# Altium footprint library PcbLib1.PcbLib: 25 footprints (part 1 of 2)
Each footprint in its own frame and in the unit in brackets; x right, y up, seen from the top. Pads: shape width x height; smd on the part's side, far side on the other; paste and mask are expansions set on the pad; w line width, h text height; cw(c..) or ccw(c..) is an arc to the next point about the centre after c.
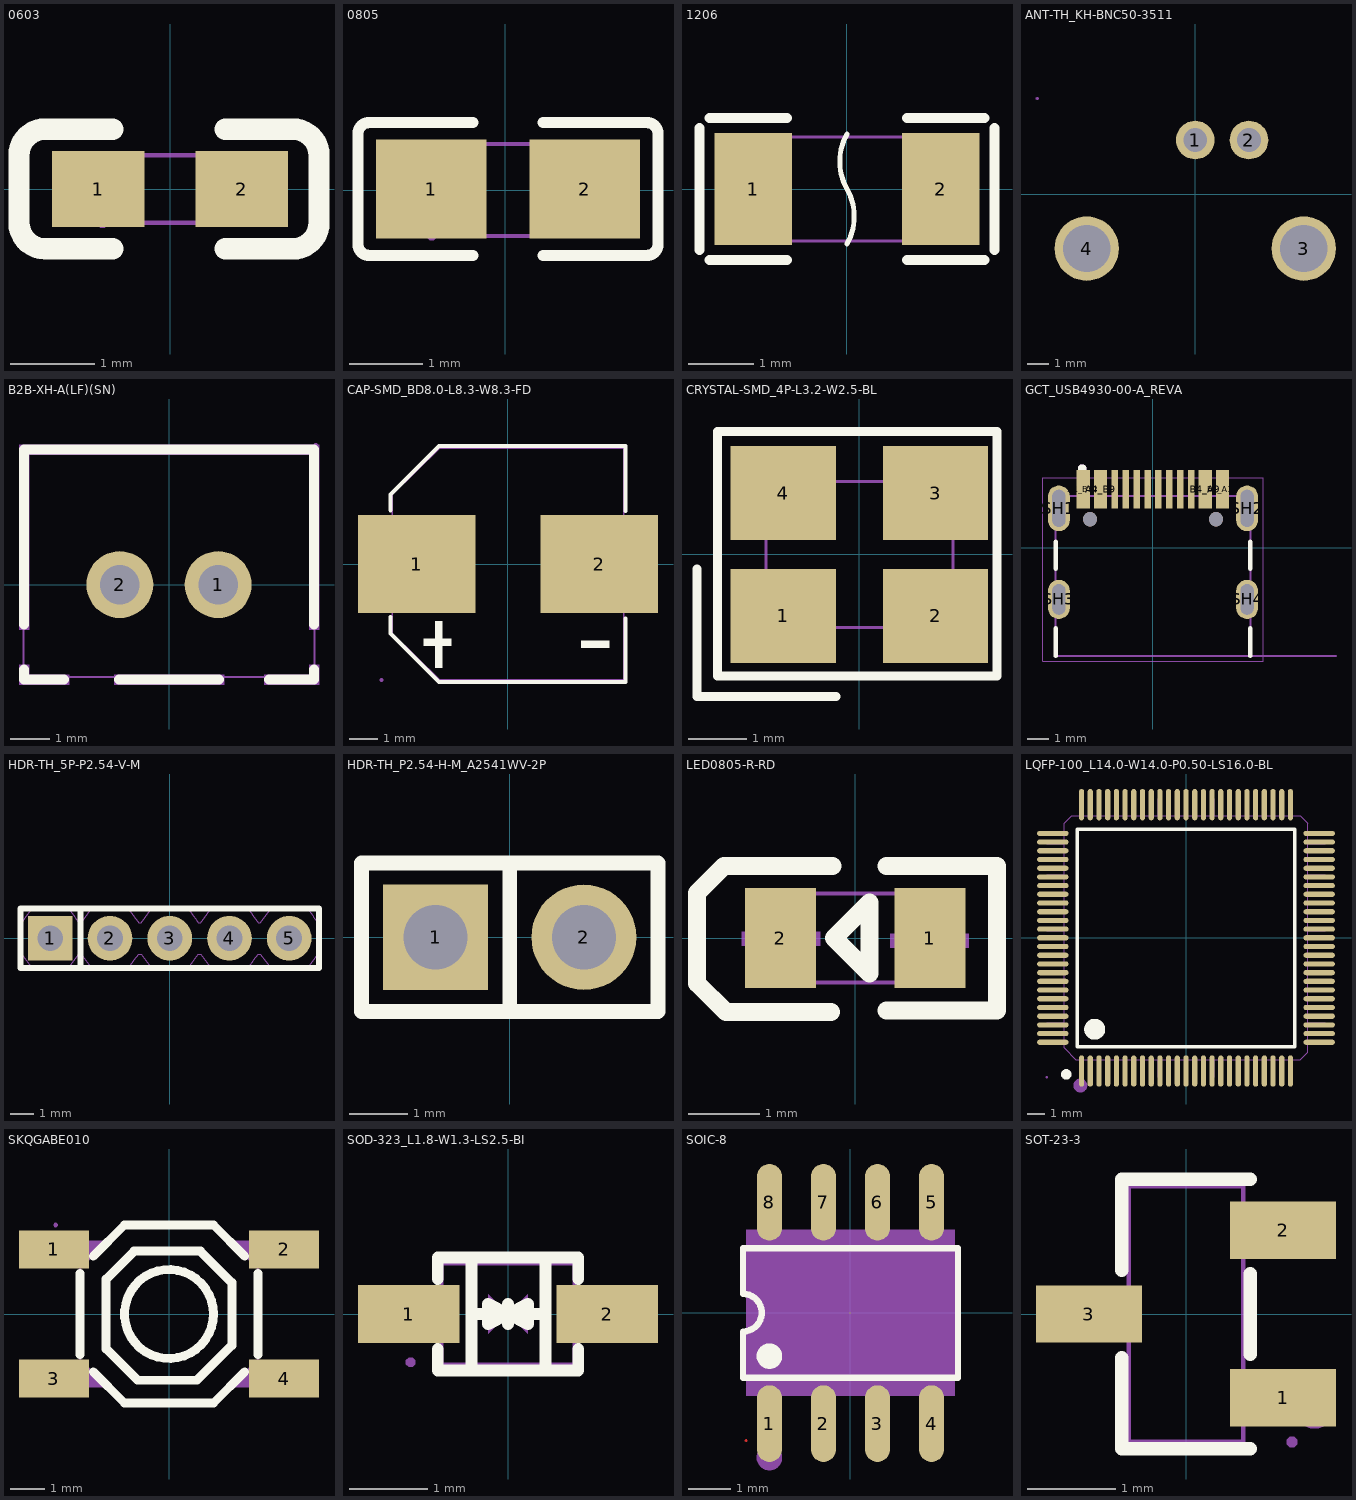
[diagram p0: the footprints below, top view; thin cyan lines are the x and y axes]

## 0603 [mm]
pads (2):
  rect 1.1x0.9 smd: 1(-0.85,0) 2(0.85,0)
Top Overlay:
  lines w0.254: -0.68,-0.71 -1.48,-0.71 cw(c-1.48,-0.4) -1.79,-0.4 -1.79,0.4 cw(c-1.48,0.4) -1.48,0.71 -0.68,0.71 ; 0.655,-0.71 1.455,-0.71 ccw(c1.455,-0.4) 1.765,-0.4 1.765,0.4 ccw(c1.455,0.4) 1.455,0.71 0.655,0.71
Mechanical 15:
  region: 0.8,-0.4 0.8,0.4 0.5,0.4 0.5,-0.4
  region: -0.8,-0.4 -0.8,0.4 -0.5,0.4 -0.5,-0.4
  region: -0.74,-0.4 -0.74,-0.425 -0.775,-0.46 -0.825,-0.46 -0.86,-0.425 -0.86,-0.4 -0.86,-0.375 -0.825,-0.34 -0.775,-0.34 -0.74,-0.375 -0.74,-0.4
  lines w0.051: -0.8,-0.4 0.8,-0.4 0.8,0.4 -0.8,0.4 -0.8,-0.4

## 0805 [mm]
pads (2):
  rect 1.5x1.35 smd mask+0.051: 1(-1.008,0.014) 2(1.082,0.014)
Top Overlay:
  lines w0.152: -0.439,-0.89 -1.849,-0.89 cw(c-1.849,-0.737) -2.002,-0.737 -2.002,0.765 cw(c-1.849,0.765) -1.849,0.918 -0.439,0.918 ; 0.513,-0.89 1.923,-0.89 ccw(c1.923,-0.737) 2.076,-0.737 2.076,0.765 ccw(c1.923,0.765) 1.923,0.918 0.513,0.918
Top Paste:
  region: 1.705,0.64 1.705,-0.64 1.655,-0.69 0.505,-0.69 0.455,-0.64 0.45,-0.23 0.9,-0.23 0.9,0.22 0.46,0.22 0.455,0.64 0.505,0.69 1.655,0.69
  region: -1.705,-0.64 -1.705,0.64 -1.655,0.69 -0.505,0.69 -0.455,0.64 -0.45,0.23 -0.9,0.23 -0.9,-0.22 -0.46,-0.22 -0.455,-0.64 -0.505,-0.69 -1.655,-0.69
Mechanical 15:
  region: 1,0.625 1,-0.625 0.5,-0.625 0.5,0.625
  region: -1,-0.625 -1,0.625 -0.5,0.625 -0.5,-0.625
  region: -0.94,-0.625 -0.94,-0.65 -0.975,-0.685 -1.025,-0.685 -1.06,-0.65 -1.06,-0.625 -1.06,-0.6 -1.025,-0.565 -0.975,-0.565 -0.94,-0.6 -0.94,-0.625
  lines w0.051: -1,-0.625 1,-0.625 1,0.625 -1,0.625 -1,-0.625

## 1206 [mm]
pads (2):
  rect 1.19x1.728 smd: 1(-1.445,0) 2(1.445,0)
Top Overlay:
  lines w0.076: 0,-0.845 ccw(c-0.732,-0.422) 0,0 cw(c0.732,0.422) 0,0.845
  lines w0.152: -2.269,-0.94 -2.269,0.94 ; -2.116,-1.093 -0.926,-1.093 ; -2.116,1.093 -0.926,1.093 ; 0.926,-1.093 2.116,-1.093 ; 0.926,1.093 2.116,1.093 ; 2.269,-0.94 2.269,0.94
Mechanical 15:
  region: 1.1,-0.8 1.6,-0.8 1.6,0.8 1.1,0.8
  region: -1.6,-0.8 -1.1,-0.8 -1.1,0.8 -1.6,0.8
  region: -1.54,-0.8 -1.54,-0.825 -1.575,-0.86 -1.625,-0.86 -1.66,-0.825 -1.66,-0.8 -1.66,-0.775 -1.625,-0.74 -1.575,-0.74 -1.54,-0.775 -1.54,-0.8
  lines w0.051: -1.6,-0.8 -1.6,0.8 1.6,0.8 1.6,-0.8 -1.6,-0.8

## ANT-TH_KH-BNC50-3511 [mm]
pads (4):
  round 1.8 hole 1.1 paste-2539.97 mask+0.05: 1(0,2.525) 2(2.5,2.525)
  round 3 hole 2.2 paste-2539.97 mask+0.05: 3(5.05,-2.525) 4(-5.05,-2.525)
Mechanical 15:
  region: -4.15,-3.425 -5.95,-3.425 -5.95,-1.625 -4.15,-1.625
  region: 5.95,-3.425 4.15,-3.425 4.15,-1.625 5.95,-1.625
  region: -7.29,4.46 -7.29,4.435 -7.325,4.4 -7.375,4.4 -7.41,4.435 -7.41,4.46 -7.41,4.485 -7.375,4.52 -7.325,4.52 -7.29,4.485 -7.29,4.46
  region: 0.3,2.525 0.3,2.465 0.254,2.355 0.17,2.271 0.06,2.225 -0.06,2.225 -0.17,2.271 -0.254,2.355 -0.3,2.465 -0.3,2.525 -0.3,2.585 -0.254,2.695 -0.17,2.779 -0.06,2.825 0.06,2.825 0.17,2.779 0.254,2.695 0.3,2.585 0.3,2.525
  region: 2.8,2.525 2.8,2.465 2.754,2.355 2.67,2.271 2.56,2.225 2.44,2.225 2.33,2.271 2.246,2.355 2.2,2.465 2.2,2.525 2.2,2.585 2.246,2.695 2.33,2.779 2.44,2.825 2.56,2.825 2.67,2.779 2.754,2.695 2.8,2.585 2.8,2.525

## B2B-XH-A(LF)(SN) [mm]
pads (2):
  round 1.7 hole 1: 1(1.25,0) 2(-1.25,0)
Top Overlay:
  lines w0.254: -3.683,-2.159 -3.683,-2.413 -2.667,-2.413 ; -3.683,-1.016 -3.683,3.429 3.683,3.429 3.683,-1.016 ; -1.27,-2.413 1.27,-2.413 ; 2.54,-2.413 3.683,-2.413 3.683,-2.159
Mechanical 6:
  region: -1.397,-2.54 -1.397,-2.286 1.397,-2.286 1.397,-2.54
  region: 2.413,-2.54 3.81,-2.54 3.81,-2.032 3.556,-2.032 3.556,-2.286 2.413,-2.286
  region: -2.54,-2.54 -3.81,-2.54 -3.81,-2.032 -3.556,-2.032 -3.556,-2.286 -2.54,-2.286
  region: -3.81,-1.143 -3.81,3.556 3.81,3.556 3.81,-1.143 3.556,-1.143 3.556,3.302 -3.556,3.302 -3.556,-1.143
Mechanical 15:
  region: 3.787,3.527 3.787,3.502 3.752,3.467 3.702,3.467 3.667,3.502 3.667,3.527 3.667,3.552 3.702,3.587 3.752,3.587 3.787,3.552 3.787,3.527
  region: -0.95,-0.32 -1.59,-0.32 -1.59,0.32 -0.95,0.32
  region: 1.59,-0.32 0.95,-0.32 0.95,0.32 1.59,0.32
  lines w0.051: -3.7,-2.35 -3.7,3.4 3.7,3.4 3.7,-2.35 -3.7,-2.35

## CAP-SMD_BD8.0-L8.3-W8.3-FD [mm]
pads (2):
  rect 4.2x3.5 smd: 1(-3.267,0) 2(3.267,0)
Top Overlay:
  region: -3.021,-2.676 -3.021,-2.924 -2.025,-2.924 -2.025,-2.676
  region: -2.599,-2.045 -2.599,-3.705 -2.35,-3.705 -2.35,-2.045
  region: 3.623,-2.751 3.623,-3 2.627,-3 2.627,-2.751
  lines w0.152: -4.201,-1.9 -4.201,-2.49 -2.465,-4.226 4.201,-4.226 4.201,-1.95 ; -4.201,1.925 -4.201,2.49 -2.465,4.226 4.201,4.226 4.201,1.9
Mechanical 6:
  region: 3.876,0.125 3.876,-0.125 2.88,-0.125 2.88,0.125
  region: -3.876,0.125 -3.876,-0.125 -2.88,-0.125 -2.88,0.125
  region: -3.503,0.83 -3.503,-0.83 -3.254,-0.83 -3.254,0.83
Mechanical 15:
  region: -4.465,-4.15 -4.465,-4.175 -4.5,-4.21 -4.549,-4.21 -4.584,-4.175 -4.584,-4.15 -4.584,-4.125 -4.549,-4.09 -4.5,-4.09 -4.465,-4.125 -4.465,-4.15
  region: 1.574,0.45 4.524,0.45 4.524,-0.45 1.574,-0.45
  region: -4.524,0.45 -1.574,0.45 -1.574,-0.45 -4.524,-0.45
  lines w0.051: -4.15,-2.49 -2.465,-4.15 4.15,-4.15 4.15,4.15 -2.465,4.15 -4.15,2.49 -4.15,-2.49

## CRYSTAL-SMD_4P-L3.2-W2.5-BL [mm]
pads (4):
  rect 1.8x1.6 smd: 1(-1.3,-1.05) 2(1.3,-1.05) 3(1.3,1.05) 4(-1.3,1.05)
Top Overlay:
  lines w0.152: -2.775,-0.25 -2.775,-2.425 -0.4,-2.425 ; -2.425,-2.075 -2.425,2.1 2.35,2.1 2.35,-2.075 -2.425,-2.075
Mechanical 6:
  circle w0.254: c-1.27,-0.889 r0.127
Mechanical 15:
  region: -1.54,-1.25 -1.54,-1.275 -1.575,-1.31 -1.625,-1.31 -1.66,-1.275 -1.66,-1.25 -1.66,-1.225 -1.625,-1.19 -1.575,-1.19 -1.54,-1.225 -1.54,-1.25
  region: -1.5,1.15 -0.6,1.15 -0.6,0.35 -1.5,0.35
  region: 0.6,1.15 1.5,1.15 1.5,0.35 0.6,0.35
  region: 0.6,-0.35 1.5,-0.35 1.5,-1.15 0.6,-1.15
  region: -1.5,-0.35 -0.6,-0.35 -0.6,-1.15 -1.5,-1.15
  lines w0.051: -1.6,-1.25 -1.6,1.25 1.6,1.25 1.6,-1.25 -1.6,-1.25

## GCT_USB4930-00-A_REVA [mm]
pads (18):
  rect 0.6x1.75 smd paste+0 mask+0.025: A1_B12(-3.2,2.678) A4_B9(-2.4,2.678) B1_A12(3.2,2.678) B4_A9(2.4,2.678)
  rect 0.3x1.75 smd paste+0 mask+0.025: A5(-1.25,2.678) A6(-0.25,2.678) A7(0.25,2.678) A8(1.25,2.678) B5(1.75,2.678) B6(0.75,2.678) B7(-0.75,2.678) B8(-1.75,2.678)
  oval 1x2.1 hole 0.6 slot 1.7 at 90 deg mask+0.102: SH1(-4.32,1.803) SH2(4.32,1.803)
  oval 1x1.8 hole 0.6 slot 1.4 at 90 deg mask+0.102: SH3(-4.32,-2.377) SH4(4.32,-2.377)
  round 0.65 hole 0.65 unplated mask+0: ""(-2.89,1.303) ""(2.89,1.303)
Top Overlay:
  circle w0.2: c-3.25,3.623 r0.1
  lines w0.2: -4.47,-4.977 -4.47,-3.697 ; -4.47,-0.977 -4.47,0.273 ; 4.47,-4.977 4.47,-3.697 ; 4.47,-0.977 4.47,0.273
Mechanical 13:
  circle w0.2: c-3.25,3.623 r0.1
  lines w0.1: 8.4,-4.977 4.47,-4.977 ; 4.47,-4.977 4.47,2.373 -4.47,2.373 -4.47,-4.977 4.47,-4.977
  text "PCB EDGE" at 5.4,-4.877 h0.41
Mechanical 15:
  lines w0.05: -5.07,-5.227 -5.07,3.203 5.07,3.203 5.07,-5.227 -5.07,-5.227

## HDR-TH_5P-P2.54-V-M [mm]
pads (5):
  rect 1.9x1.9 hole 1.1: 1(-5.08,0)
  round 1.9 hole 1.1: 2(-2.54,0) 3(0,0) 4(2.54,0) 5(5.08,0)
Top Overlay:
  lines w0.254: -3.786,-1.27 -3.786,1.27 ; -6.35,-1.27 -6.35,1.27 6.35,1.27 6.35,-1.27 -6.35,-1.27
Mechanical 15:
  region: -5.4,0.32 -4.76,0.32 -4.76,-0.32 -5.4,-0.32
  region: -2.86,0.32 -2.22,0.32 -2.22,-0.32 -2.86,-0.32
  region: -0.32,0.32 0.32,0.32 0.32,-0.32 -0.32,-0.32
  region: 2.22,0.32 2.86,0.32 2.86,-0.32 2.22,-0.32
  region: 4.76,0.32 5.4,0.32 5.4,-0.32 4.76,-0.32
  region: -6.29,-1.271 -6.29,-1.296 -6.325,-1.331 -6.375,-1.331 -6.41,-1.296 -6.41,-1.271 -6.41,-1.246 -6.375,-1.211 -6.325,-1.211 -6.29,-1.246 -6.29,-1.271
  lines w0.051: -6.35,-0.67 -6.35,-0.67 -6.3,-0.67 -5.85,-1.27 -4.31,-1.27 -4.077,-0.965 -3.86,-0.67 -3.76,-0.67 -3.31,-1.27 -1.77,-1.27 -1.542,-0.972 -1.503,-0.919 -1.32,-0.67 -1.22,-0.67 -0.77,-1.27 0.77,-1.27 0.992,-0.98 1.02,-0.942 1.22,-0.67 1.32,-0.67 1.77,-1.27 3.31,-1.271 3.51,-1.009 3.545,-0.963 3.581,-0.913 3.759,-0.67 3.86,-0.67 4.31,-1.27 5.85,-1.27 6.075,-0.976 6.3,-0.67 6.35,-0.67 6.35,0.67 6.3,0.67 6.112,0.925 6.079,0.97 5.85,1.27 4.311,1.27 3.86,0.67 3.76,0.67 3.533,0.979 3.458,1.076 3.31,1.27 1.77,1.27 1.32,0.67 1.22,0.67 1.136,0.783 1.108,0.822 1.01,0.955 0.867,1.143 0.77,1.27 -0.77,1.27 -1.22,0.67 -1.32,0.67 -1.417,0.801 -1.436,0.827 -1.459,0.859 -1.546,0.976 -1.631,1.088 -1.77,1.27 -3.31,1.27 -3.76,0.67 -3.86,0.67 -4.017,0.884 -4.048,0.925 -4.149,1.059 -4.31,1.27 -5.85,1.27 -6.028,1.032 -6.299,0.67 -6.35,0.67 -6.35,-0.67 ; -6.35,-0.67 -6.35,-0.67

## HDR-TH_P2.54-H-M_A2541WV-2P [mm]
pads (2):
  rect 1.8x1.8 hole 1.1: 1(-1.27,0)
  round 1.8 hole 1.1: 2(1.27,0)
Top Overlay:
  lines w0.254: -0.001,-1.27 -0.001,1.27 ; -2.54,-1.27 -2.54,1.27 2.54,1.27 2.54,-1.27 -2.54,-1.27
Mechanical 15:
  region: 0.95,0.32 1.59,0.32 1.59,-0.32 0.95,-0.32
  region: -1.59,0.32 -0.95,0.32 -0.95,-0.32 -1.59,-0.32
  region: -2.48,-1.27 -2.48,-1.295 -2.515,-1.33 -2.565,-1.33 -2.6,-1.295 -2.6,-1.27 -2.6,-1.245 -2.565,-1.21 -2.515,-1.21 -2.48,-1.245 -2.48,-1.27
  lines w0.051: -2.54,-1.27 2.54,-1.27 2.54,1.27 -2.54,1.27 -2.54,-1.27

## LED0805-R-RD [mm]
pads (2):
  rect 1x1.4 smd: 1(1.05,0) 2(-1.05,0)
Top Overlay:
  lines w0.254: -0.344,-1.043 -1.817,-1.043 -2.224,-0.636 -2.224,0.634 -1.843,1.015 -0.319,1.015 ; 0.443,-1.017 1.993,-1.017 1.993,1.015 0.443,1.015 ; -0.3,0 -0.2,0.1 0.2,0.5 0.2,-0.5 -0.2,-0.1 -0.3,0
Mechanical 6:
  region: 0.941,-0.556 0.941,0.544 1.141,0.544 1.141,-0.556
  region: 0.494,0.06 1.594,0.06 1.594,-0.14 0.494,-0.14
  region: -0.494,-0.109 -1.594,-0.109 -1.594,0.091 -0.494,0.091
Mechanical 15:
  region: 1.06,0.625 1.06,0.6 1.025,0.565 0.975,0.565 0.94,0.6 0.94,0.625 0.94,0.65 0.975,0.685 1.025,0.685 1.06,0.65 1.06,0.625
  region: 1,-0.625 0.6,-0.625 0.6,0.625 1,0.625
  region: -0.6,-0.625 -1,-0.625 -1,0.625 -0.6,0.625
  lines w0.051: -1,-0.625 -1,0.625 1,0.625 1,-0.625 -1,-0.625

## LQFP-100_L14.0-W14.0-P0.50-LS16.0-BL [mm]
pads (100):
  oval 0.3x1.8 smd mask+0.025: 1(-6,-7.65) 2(-5.5,-7.65) 3(-5,-7.65) 4(-4.5,-7.65) 5(-4,-7.65) 6(-3.5,-7.65) 7(-3,-7.65) 8(-2.5,-7.65) 9(-2,-7.65) 10(-1.5,-7.65) 11(-1,-7.65) 12(-0.5,-7.65) 13(0,-7.65) 14(0.5,-7.65) 15(1,-7.65) 16(1.5,-7.65) 17(2,-7.65) 18(2.5,-7.65) 19(3,-7.65) 20(3.5,-7.65) 21(4,-7.65) 22(4.5,-7.65) 23(5,-7.65) 24(5.5,-7.65) 25(6,-7.65) 51(6,7.65) 52(5.5,7.65) 53(5,7.65) 54(4.5,7.65) 55(4,7.65) 56(3.5,7.65) 57(3,7.65) 58(2.5,7.65) 59(2,7.65) 60(1.5,7.65) 61(1,7.65) 62(0.5,7.65) 63(0,7.65) 64(-0.5,7.65) 65(-1,7.65) 66(-1.5,7.65) 67(-2,7.65) 68(-2.5,7.65) 69(-3,7.65) 70(-3.5,7.65) 71(-4,7.65) 72(-4.5,7.65) 73(-5,7.65) 74(-5.5,7.65) 75(-6,7.65)
  oval 1.8x0.3 smd mask+0.025: 26(7.65,-6) 27(7.65,-5.5) 28(7.65,-5) 29(7.65,-4.5) 30(7.65,-4) 31(7.65,-3.5) 32(7.65,-3) 33(7.65,-2.5) 34(7.65,-2) 35(7.65,-1.5) 36(7.65,-1) 37(7.65,-0.5) 38(7.65,0) 39(7.65,0.5) 40(7.65,1) 41(7.65,1.5) 42(7.65,2) 43(7.65,2.5) 44(7.65,3) 45(7.65,3.5) 46(7.65,4) 47(7.65,4.5) 48(7.65,5) 49(7.65,5.5) 50(7.65,6) 76(-7.65,6) 77(-7.65,5.5) 78(-7.65,5) 79(-7.65,4.5) 80(-7.65,4) 81(-7.65,3.5) 82(-7.65,3) 83(-7.65,2.5) 84(-7.65,2) 85(-7.65,1.5) 86(-7.65,1) 87(-7.65,0.5) 88(-7.65,0) 89(-7.65,-0.5) 90(-7.65,-1) 91(-7.65,-1.5) 92(-7.65,-2) 93(-7.65,-2.5) 94(-7.65,-3) 95(-7.65,-3.5) 96(-7.65,-4) 97(-7.65,-4.5) 98(-7.65,-5) 99(-7.65,-5.5) 100(-7.65,-6)
Top Overlay:
  lines w0.2: -6.25,-6.25 -6.25,6.25 6.25,6.25 6.25,-6.25 -6.25,-6.25
  lines w0.3: -6.883,-7.696 ccw(c-6.882,-7.846) -6.882,-7.996 ccw(c-6.882,-7.846) -6.881,-7.696
  lines w0.6: -5.25,-4.95 ccw(c-5.248,-5.25) -5.248,-5.55 ccw(c-5.248,-5.25) -5.245,-4.95
Mechanical 6:
  circle w0.4: c-6.071,-8.484 r0.2
Mechanical 15:
  drawing of 209 lines, arcs and shapes, not listed

## SKQGABE010 [mm]
pads (4):
  rect 2x1.1 smd: 1(-3.3,1.85) 2(3.3,1.85) 3(-3.3,-1.85) 4(3.3,-1.85)
Top Overlay:
  circle w0.254: c0,0 r1.275
  lines w0.254: -2.55,-1.168 -2.55,1.168 ; -2.17,-1.655 -1.275,-2.55 1.275,-2.55 2.17,-1.655 ; -2.17,1.655 -1.275,2.55 1.275,2.55 2.17,1.655 ; 2.55,-1.168 2.55,1.168 ; -1.801,-0.998 -1.801,1.001 -1.001,1.801 0.899,1.801 1.801,0.899 1.801,-0.899 0.8,-1.9 -0.899,-1.9 -1.801,-0.998
Mechanical 15:
  region: -2.2,1.599 -1.7,2.099 -2.86,2.1 -2.86,1.6
  region: 2.201,-1.601 1.701,-2.101 2.861,-2.101 2.861,-1.601
  region: -2.2,-1.6 -1.7,-2.1 -2.86,-2.1 -2.86,-1.6
  region: -3.25,-2.1 -3.25,-1.6 -2.85,-1.6 -2.85,-2.1
  region: -3.25,1.599 -3.25,2.099 -2.85,2.099 -2.85,1.599
  region: 2.85,1.6 2.85,2.1 3.25,2.1 3.25,1.6
  region: 2.2,1.6 1.7,2.1 2.86,2.1 2.86,1.6
  region: 2.85,-2.1 2.85,-1.6 3.25,-1.6 3.25,-2.1
  region: -3.19,2.55 -3.19,2.525 -3.225,2.49 -3.275,2.49 -3.31,2.525 -3.31,2.55 -3.31,2.575 -3.275,2.61 -3.225,2.61 -3.19,2.575 -3.19,2.55
  lines w0.051: -2.55,-1.3 -2.55,1.3 -1.3,2.55 1.3,2.55 2.55,1.3 2.55,-1.3 1.3,-2.55 -1.3,-2.55 -2.55,-1.3

## SOD-323_L1.8-W1.3-LS2.5-BI [mm]
pads (2):
  rect 1.3x0.75 smd: 1(-1.275,0) 2(1.275,0)
Top Overlay:
  lines w0.152: -0.901,-0.448 -0.901,-0.726 0.901,-0.726 0.901,-0.448 ; -0.901,0.448 -0.901,0.726 0.901,0.726 0.901,0.448 ; -0.467,-0.726 -0.467,0.726 ; 0.483,-0.726 0.483,0.726
  lines w0.154: -0.467,0 0.483,0.003 ; -0.127,0 0.003,0 0.254,0.127 0.254,-0.127 0.002,-0.003 ; -0.002,0.003 -0.254,0.127 -0.254,-0.127 -0.003,0 0.127,0 ; 0,-0.127 0,0.127
Mechanical 6:
  region: 0.254,-0.254 0.254,0.254 0,0
  region: -0.254,0.254 -0.254,-0.254 0,0
Mechanical 15:
  region: -1.25,-0.163 -1.25,0.163 -0.95,0.163 -0.95,-0.163
  region: -0.96,-0.163 -0.96,0.163 -0.84,0.163 -0.84,-0.163
  region: 0.95,-0.163 0.95,0.163 1.25,0.163 1.25,-0.163
  region: 0.84,-0.163 0.84,0.163 0.96,0.163 0.96,-0.163
  region: -1.19,-0.62 -1.19,-0.645 -1.225,-0.68 -1.275,-0.68 -1.31,-0.645 -1.31,-0.62 -1.31,-0.595 -1.275,-0.56 -1.225,-0.56 -1.19,-0.595 -1.19,-0.62
  lines w0.051: -0.85,-0.65 0.85,-0.65 0.85,0.65 -0.85,0.65 -0.85,-0.65

## SOIC-8 [mm]
pads (8):
  oval 0.588x1.8 smd paste+0 mask+0.051: 1(-1.905,-2.6) 2(-0.635,-2.6) 3(0.635,-2.6) 4(1.905,-2.6) 5(1.905,2.6) 6(0.635,2.6) 7(-0.635,2.6) 8(-1.905,2.6)
Top Layer:
  region: -2.42,-3 -2.42,-2.988 -2.438,-2.97 -2.462,-2.97 -2.48,-2.988 -2.48,-3 -2.48,-3.012 -2.462,-3.03 -2.438,-3.03 -2.42,-3.012 -2.42,-3
Top Overlay:
  lines w0.15: -2.068,-1.521 -2.526,-1.521 ; -2.068,1.521 -2.526,1.521 ; -1.742,-1.521 -0.798,-1.521 ; -1.742,1.521 -0.798,1.521 ; -0.472,-1.521 0.472,-1.521 ; -0.472,1.521 0.472,1.521 ; 0.798,-1.521 1.742,-1.521 ; 0.798,1.521 1.742,1.521 ; 2.068,-1.521 2.526,-1.521 ; 2.068,1.521 2.526,1.521 ; -2.526,-1.521 2.526,-1.521 ; -2.526,-1.521 -2.526,-0.435 ccw(c-2.526,0.007) -2.526,0.449 -2.526,1.521 ; -2.526,1.521 2.526,1.521 ; 2.526,-1.521 2.526,1.521
  lines w0.3: -2.055,-1.016 cw(c-1.905,-1.016) -1.755,-1.016 cw(c-1.905,-1.016) -2.055,-1.016
Mechanical 6:
  lines w0.3: -2.055,-3.4 cw(c-1.905,-3.4) -1.755,-3.4 cw(c-1.905,-3.4) -2.055,-3.4
Mechanical 15:
  region: -2.45,-1.95 -2.45,1.95 2.45,1.95 2.45,-1.95
  region: -2.115,-3 -2.115,-2.165 -1.695,-2.165 -1.695,-3
  region: -2.115,-2.175 -2.115,-1.94 -1.695,-1.94 -1.695,-2.175
  region: -0.845,-3 -0.845,-2.165 -0.425,-2.165 -0.425,-3
  region: -0.845,-2.175 -0.845,-1.94 -0.425,-1.94 -0.425,-2.175
  region: 0.425,-3 0.425,-2.165 0.845,-2.165 0.845,-3
  region: 0.425,-2.175 0.425,-1.94 0.845,-1.94 0.845,-2.175
  region: 1.695,-3 1.695,-2.165 2.115,-2.165 2.115,-3
  region: 1.695,-2.175 1.695,-1.94 2.115,-1.94 2.115,-2.175
  region: -2.115,3 -2.115,2.165 -1.695,2.165 -1.695,3
  region: -2.115,2.175 -2.115,1.94 -1.695,1.94 -1.695,2.175
  region: -0.845,3 -0.845,2.165 -0.425,2.165 -0.425,3
  region: -0.845,2.175 -0.845,1.94 -0.425,1.94 -0.425,2.175
  region: 0.425,3 0.425,2.165 0.845,2.165 0.845,3
  region: 0.425,2.175 0.425,1.94 0.845,1.94 0.845,2.175
  region: 1.695,3 1.695,2.165 2.115,2.165 2.115,3
  region: 1.695,2.175 1.695,1.94 2.115,1.94 2.115,2.175

## SOT-23-3 [mm]
pads (3):
  rect 1.2x0.65 smd: 1(1.1,-0.95) 2(1.1,0.95) 3(-1.1,0)
Top Overlay:
  lines w0.152: -0.726,-0.495 -0.726,-1.526 0.726,-1.526 ; -0.726,0.495 -0.726,1.526 0.726,1.526 ; 0.726,-0.455 0.726,0.455
Mechanical 6:
  circle w0.2: c1.46,-1.1 r0.1
Mechanical 15:
  region: 1.26,-1.45 1.26,-1.475 1.225,-1.51 1.175,-1.51 1.14,-1.475 1.14,-1.45 1.14,-1.425 1.175,-1.39 1.225,-1.39 1.26,-1.425 1.26,-1.45
  region: 0.64,0.735 0.64,1.165 0.91,1.165 0.91,0.735
  region: 0.9,0.735 0.9,1.165 1.2,1.165 1.2,0.735
  region: 0.64,-1.165 0.64,-0.735 0.91,-0.735 0.91,-1.165
  region: 0.9,-1.165 0.9,-0.735 1.2,-0.735 1.2,-1.165
  region: -0.91,-0.215 -0.91,0.215 -0.64,0.215 -0.64,-0.215
  region: -1.2,-0.215 -1.2,0.215 -0.9,0.215 -0.9,-0.215
  lines w0.051: -0.65,-1.45 -0.65,1.45 0.65,1.45 0.65,-1.45 -0.65,-1.45